# Altium footprint library amirlib.PcbLib: 456 footprints (part 1 of 29)
Each footprint in its own frame and in the unit in brackets; x right, y up, seen from the top. Pads: shape width x height; smd on the part's side, far side on the other; paste and mask are expansions set on the pad; w line width, h text height; cw(c..) or ccw(c..) is an arc to the next point about the centre after c.
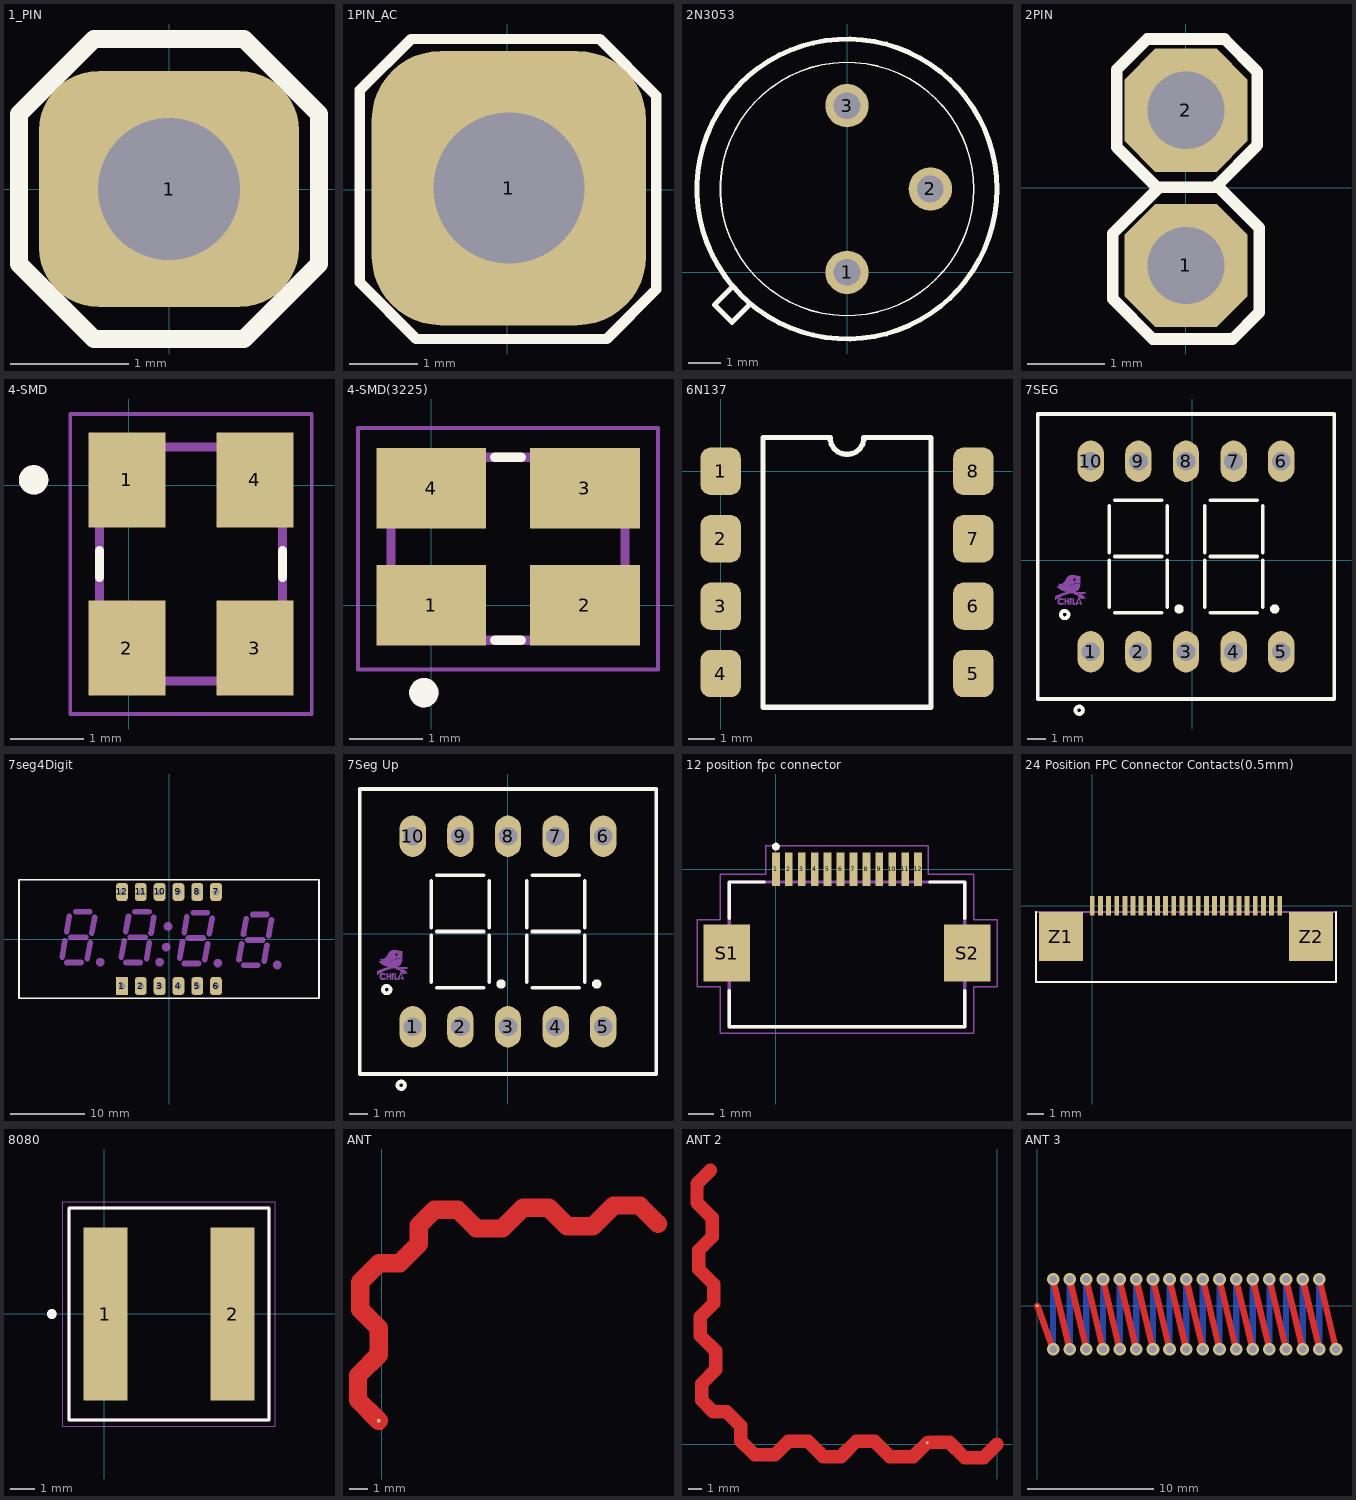
[diagram p0: the footprints below, top view; thin cyan lines are the x and y axes]

## 1_PIN [mm]
pads (1):
  rrect50% 2.2x2 hole 1.2: 1(0,0)
Top Overlay:
  region: -0.254,0.254 -0.254,-0.254 0.254,-0.254 0.254,0.254
  lines w0.152: -1.27,-0.635 -0.635,-1.27 0.635,-1.27 1.27,-0.635 1.27,0.635 0.635,1.27 -0.635,1.27 -1.27,0.635 -1.27,-0.635

## 1PIN_AC [mm]
pads (1):
  rrect50% 4x4 hole 2.2: 1(0.025,0.025)
Top Overlay:
  region: -0.254,0.254 -0.254,-0.254 0.254,-0.254 0.254,0.254
  lines w0.152: -2.15,-1.35 -2.15,1.45 -1.4,2.2 1.35,2.2 2.175,1.375 2.175,-1.45 1.45,-2.175 -1.325,-2.175 -2.15,-1.35

## 2N3053 [mil]
pads (3):
  round 52 hole 32: 1(0,0) 2(100,100) 3(0,200)
Top Overlay:
  circle w6: c0,100 r180
  circle w2: c0,100 r152
  lines w6: -138,-18 -159,-39 -138,-60 -117,-39

## 2PIN [mm]
pads (2):
  oct 1.6x1.6 hole 1: 1(0,-1.007) 2(0,1.008)
Top Overlay:
  region: 0.279,-1.245 0.279,-0.737 -0.229,-0.737 -0.229,-1.245
  region: 0.279,0.737 0.279,1.245 -0.229,1.245 -0.229,0.737
  lines w0.152: -0.365,-0.007 -0.9,0.527 -0.9,1.537 -0.504,1.933 0.5,1.933 0.925,1.508 0.925,0.553 0.403,0.03 ; -0.95,-1.442 -0.43,-1.962 0.605,-1.962 0.95,-1.617 0.95,-0.517 0.425,0.008 -0.35,0.008 -0.95,-0.592 -0.95,-1.442

## 4-SMD [mm]
pads (4):
  rect 1.05x1.3 smd: 1(-0.025,0.075) 2(-0.025,-2.225) 3(1.725,-2.225) 4(1.725,0.075)
Top Overlay:
  circle w0.2: c-1.3,0.075 r0.1
  lines w0.127: -0.4,-1.255 -0.4,-0.895 ; 2.1,-1.255 2.1,-0.895
Mechanical 13:
  circle w0.2: c-1.3,0.075 r0.1
  lines w0.127: -0.4,-2.675 -0.4,0.525 2.1,0.525 2.1,-2.675 -0.4,-2.675
Mechanical 15:
  lines w0.05: -0.8,-3.125 -0.8,0.975 2.5,0.975 2.5,-3.125 -0.8,-3.125
3D body "step_temp.STEP": height 0.8, standoff 0, extent -0.4,-2.675 2.1,0.525

## 4-SMD(3225) [mm]
pads (4):
  rect 1.5x1.1 smd mask+0.05: 1(0,0) 2(2.1,0) 3(2.1,1.6) 4(0,1.6)
Top Overlay:
  circle w0.2: c-0.102,-1.194 r0.1
  lines w0.127: 0.868,-0.477 1.228,-0.477 ; 0.868,2.023 1.228,2.023
Mechanical 13:
  circle w0.2: c-0.102,-1.194 r0.1
  lines w0.127: -0.552,-0.477 -0.552,2.023 2.648,2.023 2.648,-0.477 -0.552,-0.477
Mechanical 15:
  lines w0.05: -1.002,-0.877 -1.002,2.423 3.098,2.423 3.098,-0.877 -1.002,-0.877
3D body "User Library-SMD-3225_4P.STEP": height 1.05, standoff 0, extent -0.533,-0.437 2.667,2.063

## 6N137 [mm]
pads (8):
  rrect50% 1.52x1.78 smd: 1(0,0) 2(0,-2.54) 3(0,-5.08) 4(0,-7.62) 5(9.52,-7.62) 6(9.52,-5.08) 7(9.52,-2.54) 8(9.52,0)
Top Overlay:
  lines w0.2: 1.595,-8.89 1.595,1.27 4.125,1.27 ccw(c4.76,1.27) 5.395,1.27 7.925,1.27 7.925,-8.89 1.595,-8.89
3D body "User Library-pdip8-smd.STEP": height 5.08, standoff 0, extent -0.45,-8.78 9.85,1.13

## 7SEG [mm]
pads (10):
  oval 1.4x2.2 hole 1: 1(-5.421,-4.879) 2(-2.881,-4.879) 3(-0.341,-4.879) 4(2.199,-4.879) 5(4.739,-4.879) 6(4.739,5.281) 7(2.199,5.281) 8(-0.341,5.281) 9(-2.881,5.281) 10(-5.421,5.281)
Top Overlay:
  circle w0.2: c-6.811,-2.899 r0.2
  circle w0.2: c-6.041,-7.999 r0.2
  circle w0.25: c-0.711,-2.599 r0.125
  circle w0.25: c4.389,-2.599 r0.125
  lines w0.2: -4.441,-2.499 -4.441,0.001 ; -4.441,0.401 -4.441,2.901 ; -4.141,-2.799 -1.641,-2.799 ; -4.141,0.201 -1.641,0.201 ; -4.141,3.201 -1.641,3.201 ; -1.341,-2.499 -1.341,0.001 ; -1.341,0.401 -1.341,2.901 ; 0.659,-2.499 0.659,0.001 ; 0.659,0.401 0.659,2.901 ; 0.959,-2.799 3.459,-2.799 ; 0.959,0.201 3.459,0.201 ; 0.959,3.201 3.459,3.201 ; 3.759,-2.499 3.759,0.001 ; 3.759,0.401 3.759,2.901 ; -8.241,-7.399 -8.241,7.801 7.559,7.801 7.559,-7.399 -8.241,-7.399
Mechanical 16:
  drawing of 8 lines, arcs and shapes, not listed
3D body "DX03-11.STEP": height 7.3, standoff -3.9, extent -8.091,-7.298 7.409,7.702

## 7seg4Digit [mm]
pads (12):
  rect 1.6x2.4 hole 0.9: 1(-6.35,-6.35)
  rrect50% 1.6x2.4 hole 0.9: 2(-3.81,-6.35) 3(-1.27,-6.35) 4(1.27,-6.35) 5(3.81,-6.35) 6(6.35,-6.35) 7(6.35,6.35) 8(3.81,6.35) 9(1.27,6.35) 10(-1.27,6.35) 11(-3.81,6.35) 12(-6.35,6.35)
Top Overlay:
  lines w0.254: -20.25,-8 -20.25,8 20.25,8 20.25,-8 -20.25,-8
Mechanical 1:
  circle w0.86: c-0.131,1.7 r0.15
  circle w0.86: c-0.385,-1.094 r0.15
  circle w0.86: c14.601,-3.507 r0.15
  circle w0.86: c6.6,-3.253 r0.15
  circle w0.86: c-1.274,-3.126 r0.15
  circle w0.86: c-9.275,-3.126 r0.15
  lines w0.762: -14.435,-2.436 -14.055,-0.266 ; -13.825,1.014 -13.465,3.094 ; -13.805,-3.176 -11.885,-3.176 ; -13.249,0.254 -11.241,0.254 ; -12.585,3.684 -10.695,3.684 ; -11.025,-2.636 -10.655,-0.506 ; -10.425,0.814 -10.045,2.944 ; -6.434,-2.436 -6.054,-0.266 ; -5.824,1.014 -5.464,3.094 ; -5.804,-3.176 -3.884,-3.176 ; -5.248,0.254 -3.24,0.254 ; -4.584,3.684 -2.694,3.684 ; -3.024,-2.636 -2.654,-0.506 ; -2.424,0.814 -2.044,2.944 ; 1.44,-2.563 1.82,-0.393 ; 2.05,0.887 2.41,2.967 ; 2.07,-3.303 3.99,-3.303 ; 2.626,0.127 4.634,0.127 ; 3.29,3.557 5.18,3.557 ; 4.85,-2.763 5.22,-0.633 ; 5.45,0.687 5.83,2.817 ; 9.441,-2.817 9.821,-0.647 ; 10.051,0.633 10.411,2.713 ; 10.071,-3.557 11.991,-3.557 ; 10.627,-0.127 12.635,-0.127 ; 11.291,3.303 13.181,3.303 ; 12.851,-3.017 13.221,-0.887 ; 13.451,0.433 13.831,2.563
3D body "4041BS_Type-I(1).step": height 11, standoff -2.5, extent -20.25,-8 20.25,8

## 7Seg Up [mm]
pads (10):
  oval 1.4x2.2 hole 1: 1(-5.065,-4.955) 2(-2.525,-4.955) 3(0.015,-4.955) 4(2.555,-4.955) 5(5.095,-4.955) 6(5.095,5.205) 7(2.555,5.205) 8(0.015,5.205) 9(-2.525,5.205) 10(-5.065,5.205)
Top Overlay:
  circle w0.25: c4.745,-2.675 r0.125
  circle w0.25: c-0.355,-2.675 r0.125
  circle w0.2: c-5.685,-8.075 r0.2
  circle w0.2: c-6.455,-2.975 r0.2
  lines w0.2: -4.085,-2.575 -4.085,-0.075 ; -4.085,0.325 -4.085,2.825 ; -3.785,-2.875 -1.285,-2.875 ; -3.785,0.125 -1.285,0.125 ; -3.785,3.125 -1.285,3.125 ; -0.985,-2.575 -0.985,-0.075 ; -0.985,0.325 -0.985,2.825 ; 1.015,-2.575 1.015,-0.075 ; 1.015,0.325 1.015,2.825 ; 1.315,-2.875 3.815,-2.875 ; 1.315,0.125 3.815,0.125 ; 1.315,3.125 3.815,3.125 ; 4.115,-2.575 4.115,-0.075 ; 4.115,0.325 4.115,2.825 ; -7.885,-7.475 7.915,-7.475 7.915,7.725 -7.885,7.725 -7.885,-7.475
Mechanical 16:
  drawing of 8 lines, arcs and shapes, not listed
3D body "DX03-11.STEP": height 10.3, standoff -0.9, extent -7.735,-7.375 7.765,7.625

## 12 position fpc connector [mm]
pads (14):
  rect 0.3x1.3 smd paste-2: 1(0,0) 2(0.5,0) 3(1,0) 4(1.5,0) 5(2,0) 6(2.5,0) 7(3,0) 8(3.5,0) 9(4,0) 10(4.5,0) 11(5,0) 12(5.5,0)
  rect 1.8x2.2 smd: S1(-1.9,-3.25) S2(7.4,-3.25)
Top Overlay:
  circle w0.15: c0,0.869 r0.075
  lines w0.127: -1.8,-4.7 -1.8,-6.1 7.3,-6.1 7.3,-4.7 ; -1.8,-1.9 -1.8,-0.5 -0.45,-0.5 ; 5.95,-0.5 7.3,-0.5 7.3,-1.9
Top Paste:
  region: 2.625,-0.651 2.375,-0.651 2.375,0.65 2.625,0.65
  region: 3.625,-0.651 3.375,-0.651 3.375,0.65 3.625,0.65
  region: 2.125,-0.651 1.874,-0.651 1.874,0.65 2.125,0.65
  region: 4.125,-0.65 3.876,-0.65 3.876,0.65 4.125,0.65
  region: 1.625,-0.65 1.374,-0.65 1.374,0.65 1.625,0.65
  region: 4.625,-0.651 4.377,-0.651 4.377,0.65 4.625,0.65
  region: 1.125,-0.65 0.874,-0.65 0.874,0.65 1.125,0.65
  region: 5.125,-0.65 4.876,-0.65 4.876,0.65 5.125,0.65
  region: 0.625,-0.65 0.373,-0.65 0.373,0.65 0.625,0.65
  region: 3.125,-0.651 2.875,-0.651 2.875,0.65 3.125,0.65
  region: 0.125,-0.651 -0.13,-0.651 -0.13,0.65 0.125,0.65
  region: 5.625,-0.651 5.377,-0.651 5.377,0.65 5.625,0.65
Mechanical 13:
  lines w0.127: -1.8,-6.1 7.3,-6.1 7.3,-0.5 -1.8,-0.5 -1.8,-6.1
Mechanical 15:
  lines w0.05: -3.05,-4.55 -3.05,-1.95 -2.15,-1.95 -2.15,-0.2 -0.4,-0.2 -0.4,0.9 5.9,0.9 5.9,-0.2 7.65,-0.2 7.65,-1.95 8.55,-1.95 8.55,-4.55 7.65,-4.55 7.65,-6.35 -2.15,-6.35 -2.15,-4.55 -3.05,-4.55
3D body "FH12-12S-0.5SH(55)--3DModel-STEP-1.STEP": height 2.11, standoff 0.01, extent -2.3,-6.146 7.8,0.254

## 24 Position FPC Connector Contacts(0.5mm) [mm]
pads (26):
  rect 0.3x1.2 smd: 1(0,0) 2(0.5,0) 3(1,0) 4(1.5,0) 5(2,0) 6(2.5,0) 7(3,0) 8(3.5,0) 9(4,0) 10(4.5,0) 11(5,0) 12(5.5,0) 13(6,0) 14(6.5,0) 15(7,0) 16(7.5,0) 17(8,0) 18(8.5,0) 19(9,0) 20(9.5,0) 21(10,0) 22(10.5,0) 23(11,0) 24(11.5,0)
  rect 2.7x3 smd: Z1(-1.93,-1.9) Z2(13.43,-1.9)
Top Overlay:
  lines w0.127: -3.45,-0.4 -3.45,-4.7 14.95,-4.7 14.95,-0.4
Mechanical 13:
  lines w0.127: -3.45,-4.7 -3.45,-0.4 14.95,-0.4 14.95,-4.7 -3.45,-4.7
3D body "68712414522.stp": height 2.08, standoff -0.02, extent -3.45,-4.827 14.95,0.273

## 8080 [mm]
pads (2):
  rect 1.78x7 smd: 1(0.035,-0.017) 2(5.195,-0.017)
Top Overlay:
  circle w0.2: c-2.135,-0.017 r0.1
  lines w0.127: -1.435,-4.317 6.665,-4.317 6.665,4.283 -1.435,4.283 -1.435,-4.317
Mechanical 13:
  circle w0.2: c-2.135,-0.017 r0.1
  lines w0.127: -1.435,-4.317 6.665,-4.317 6.665,4.283 -1.435,4.283 -1.435,-4.317
Mechanical 15:
  lines w0.05: -1.685,-4.567 6.915,-4.567 6.915,4.533 -1.685,4.533 -1.685,-4.567
3D body "XAL8080-472MED--3DModel-STEP-56544.STEP": height 8, standoff 0, extent -1.434,-4.173 6.666,4.427

## ANT [mm]
pads (1):
  rrect50% 0.2x0.2 smd: 1(-0.164,5.5)
Top Layer:
  lines w1: 14.986,16.175 13.986,17.175 12.586,17.175 11.461,16.05 10.061,16.05 9.061,17.05 7.661,17.05 6.536,15.925 5.136,15.925 4.111,16.95 2.875,16.95 2.011,16.086 2.011,15.086 0.975,14.05 -0.139,14.05 -1.164,13.025 -1.164,11.575 -1.164,11.525 -0.164,10.525 -0.164,9.075 -1.214,8.025 -1.289,7.95 -1.289,6.625 -0.164,5.5 ; -0.164,5.5 -0.164,5.5
Top Solder:
  lines w1: -0.164,5.5 -1.289,6.625 -1.289,7.95 -0.164,9.075 -0.164,10.525 -1.164,11.525 -1.164,13.025 -0.139,14.05 0.95,14.05 1.986,15.086 2.011,15.086 2.011,16.086 2.875,16.95 4.111,16.95 5.136,15.925 6.536,15.925 7.661,17.05 9.061,17.05 10.061,16.05 11.461,16.05 12.586,17.175 13.986,17.175 14.986,16.175

## ANT 2 [mm]
pads (1):
  rrect50% 0.2x0.2 smd: 1(-5.175,0.111)
Top Layer:
  lines w1: -21.225,20.286 -22.225,19.286 -22.225,17.886 -21.1,16.761 -21.1,15.361 -22.1,14.361 -22.1,12.961 -20.975,11.836 -20.975,10.436 -21.975,9.436 -21.975,8.036 -20.85,6.911 -20.85,5.511 -21.875,4.486 -21.875,3.25 -21.011,2.386 -20.011,2.386 -18.975,1.35 -18.975,0.236 -17.95,-0.789 -16.5,-0.789 -16.45,-0.789 -15.45,0.211 -14,0.211 -12.95,-0.839 -12.875,-0.914 -11.55,-0.914 -10.425,0.211 ; -5.175,0.111 -6.2,-0.914 -7.925,-0.914 -7.95,-0.914 -9.075,0.211 -10.425,0.211 ; -4.925,0.125 -3.525,0.125 -2.4,-1 -1,-1 0,0 ; -10.425,0.211 -10.425,0.211
Top Solder:
  lines w1: -21.225,20.286 -22.225,19.286 -22.225,17.886 -21.1,16.761 -21.1,15.361 -22.1,14.361 -22.1,12.961 -20.975,11.836 -20.975,10.436 -21.975,9.436 -21.975,8.036 -20.85,6.911 -20.85,5.511 -21.875,4.486 -21.875,3.25 -21.011,2.386 -20.011,2.386 -20.011,2.361 -18.975,1.325 -18.975,0.236 -17.95,-0.789 -16.45,-0.789 -15.45,0.211 -14,0.211 -12.875,-0.914 -11.55,-0.914 -10.425,0.211 -9.075,0.211 -7.95,-0.914 -7.925,-0.914 -6.2,-0.914 -5.175,0.111 ; -4.925,0.125 -3.525,0.125 -2.4,-1 -1,-1 0,0

## ANT 3 [mm]
pads (1):
  round 0.2 smd: 1(0,0)
via 18.349,-3.429 diameter 1 hole 0.6
via 7.827,2.095 diameter 1 hole 0.6
via 3.881,2.095 diameter 1 hole 0.6
via 2.566,2.095 diameter 1 hole 0.6
via 6.512,2.095 diameter 1 hole 0.6
via 1.25,2.095 diameter 1 hole 0.6
via 5.196,2.095 diameter 1 hole 0.6
via 3.881,-3.429 diameter 1 hole 0.6
via 5.196,-3.429 diameter 1 hole 0.6
via 6.512,-3.429 diameter 1 hole 0.6
via 1.25,-3.429 diameter 1 hole 0.6
via 2.566,-3.429 diameter 1 hole 0.6
via 13.088,-3.429 diameter 1 hole 0.6
via 20.98,2.095 diameter 1 hole 0.6
via 20.98,-3.429 diameter 1 hole 0.6
via 19.664,2.095 diameter 1 hole 0.6
via 17.034,2.095 diameter 1 hole 0.6
via 18.349,2.095 diameter 1 hole 0.6
via 14.403,2.095 diameter 1 hole 0.6
via 15.718,2.095 diameter 1 hole 0.6
via 14.403,-3.429 diameter 1 hole 0.6
via 15.719,-3.429 diameter 1 hole 0.6
via 17.034,-3.429 diameter 1 hole 0.6
via 19.664,-3.429 diameter 1 hole 0.6
via 13.088,2.095 diameter 1 hole 0.6
via 10.458,-3.429 diameter 1 hole 0.6
via 9.142,-3.429 diameter 1 hole 0.6
via 7.827,-3.429 diameter 1 hole 0.6
via 11.773,-3.429 diameter 1 hole 0.6
via 22.296,-3.429 diameter 1 hole 0.6
via 11.773,2.095 diameter 1 hole 0.6
via 10.458,2.095 diameter 1 hole 0.6
via 9.142,2.095 diameter 1 hole 0.6
via 22.296,2.095 diameter 1 hole 0.6
via 23.612,-3.429 diameter 1 hole 0.6
Top Layer:
  lines w0.5: 0,0 1.25,-3.429 ; 1.25,2.095 2.566,-3.429 ; 2.566,2.095 3.881,-3.429 ; 3.881,2.095 5.196,-3.429 ; 5.196,2.095 6.512,-3.429 6.428,-3.369 6.395,-3.345 6.366,-3.316 ; 6.512,2.095 7.827,-3.429 ; 7.827,2.095 9.142,-3.429 ; 9.142,2.095 10.458,-3.429 ; 10.458,2.095 11.773,-3.429 ; 11.773,2.095 13.088,-3.429 ; 13.088,2.095 14.403,-3.429 ; 14.403,2.095 15.719,-3.429 ; 15.718,2.095 17.034,-3.429 ; 17.034,2.095 18.349,-3.429 ; 18.349,2.095 19.664,-3.429 ; 19.664,2.095 20.98,-3.429 ; 20.98,2.095 22.296,-3.429 ; 22.296,2.095 23.612,-3.429 ; 6.366,-3.316 ccw(c6.719,-2.963) 6.366,-3.316 ; 5.364,2.183 5.364,2.183
Bottom Layer:
  lines w0.5: 1.25,-3.429 1.25,2.095 ; 2.566,-3.429 2.566,2.095 ; 3.881,-3.429 3.881,2.095 ; 5.196,-3.429 5.196,2.095 ; 6.512,-3.429 6.512,2.095 ; 7.827,-3.429 7.827,2.095 ; 9.142,-3.429 9.142,2.095 ; 10.458,-3.429 10.458,2.095 ; 11.773,-3.429 11.773,2.095 ; 13.088,-3.429 13.088,2.095 ; 14.403,-3.429 14.403,2.095 ; 17.034,-3.429 17.034,2.095 ; 18.349,-3.429 18.349,2.095 ; 19.664,-3.429 19.664,2.095 ; 20.98,-3.429 20.98,2.095 ; 22.296,-3.429 22.296,2.095 ; 15.719,-3.429 15.719,2.095 ; 15.719,-3.429 15.719,-3.429 ; 15.718,2.095 15.719,2.095
Top Solder:
  lines w0.5: 1.25,2.095 2.566,-3.429